# Altium footprint library FootPrintLib_0.PcbLib: 266 footprints (part 5 of 17)
Each footprint in its own frame and in the unit in brackets; x right, y up, seen from the top. Pads: shape width x height; smd on the part's side, far side on the other; paste and mask are expansions set on the pad; w line width, h text height; cw(c..) or ccw(c..) is an arc to the next point about the centre after c.
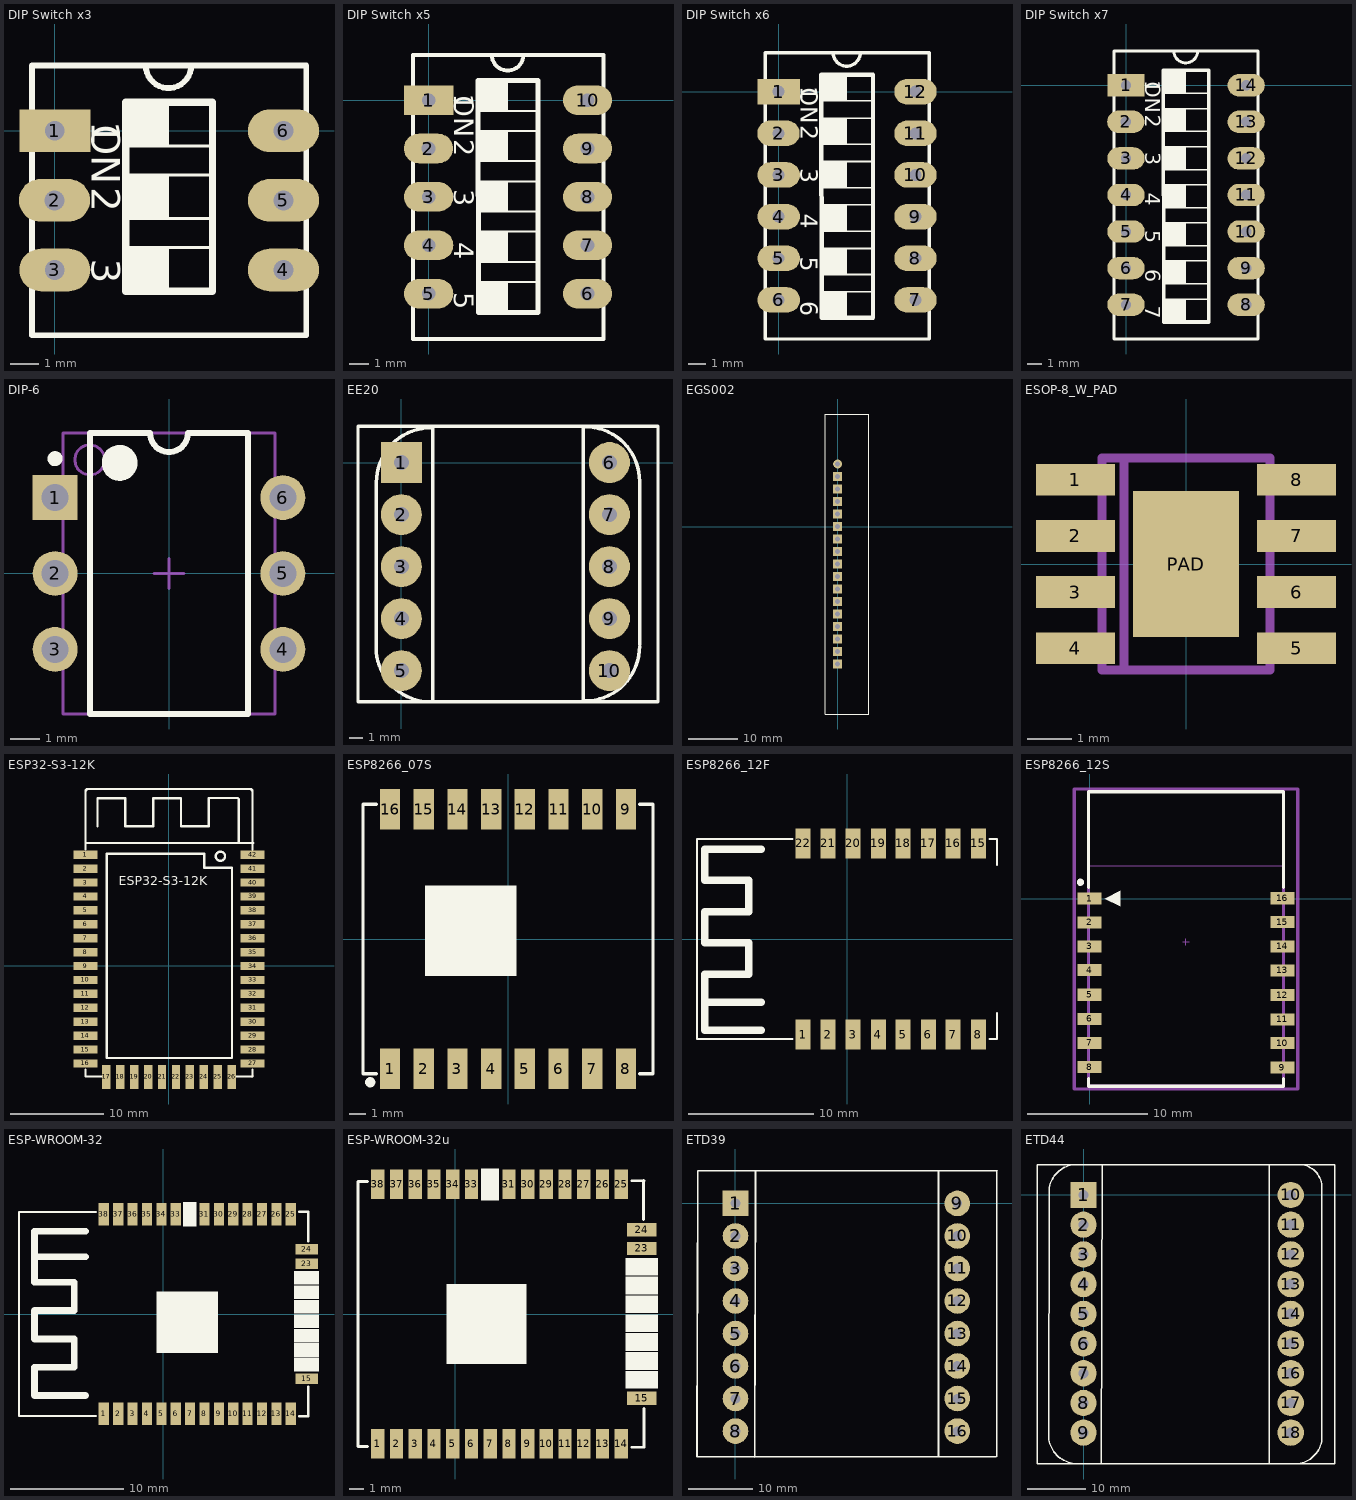
[diagram p4: the footprints below, top view; thin cyan lines are the x and y axes]

## DIP Switch x3 [mm]
height 6.5
pads (6):
  rect 2.5x1.5 hole 0.7: 1(0,0)
  oval 2.5x1.5 hole 0.7: 2(-0.01,-2.45) 3(0,-4.9) 4(8.05,-4.9) 5(8.05,-2.45) 6(8.05,0)
Top Overlay:
  rectangle: 2.5,-5.662 4.025,-4.106
  rectangle: 2.5,-3.106 4.025,-1.55
  rectangle: 2.5,-0.556 4.025,1
  lines w0.1: 2.53,-4.11 5.55,-4.11 ; 2.53,-3.09 5.55,-3.09 ; 2.53,-1.56 5.55,-1.56 ; 2.53,-0.54 5.55,-0.54
  lines w0.2: 3.202,2.3 ccw(c4.002,2.3) 4.802,2.3 ; -0.8,-7.2 8.85,-7.2 8.85,2.3 -0.8,2.3 -0.8,-7.2
  lines w0.25: 2.53,-5.65 5.55,-5.65
  lines w0.254: 2.5,-5.662 2.5,1 5.55,1 5.55,-5.65
  text "3" at 1.295,-4.5 h1
  text "2" at 1.295,-1.98 h1
  text "1" at 1.295,0.33 h1
  text "ON" at 1.295,0.22 h1
3D body "DS1040-03 (DIP_switch).stp": height 6.8, standoff -3.85, extent -0.911,-7.029 8.989,2.051

## DIP Switch x5 [mm]
height 6.5
pads (10):
  rect 2.5x1.5 hole 0.7: 1(0,0)
  oval 2.5x1.5 hole 0.7: 2(-0.01,-2.45) 3(0,-4.9) 4(0,-7.35) 5(0,-9.8) 6(8.05,-9.8) 7(8.05,-7.35) 8(8.05,-4.9) 9(8.05,-2.45) 10(8.05,0)
Top Overlay:
  rectangle: 2.5,-0.556 4.025,1
  rectangle: 2.5,-3.106 4.025,-1.55
  rectangle: 2.5,-5.662 4.025,-4.106
  rectangle: 2.5,-8.216 4.025,-6.66
  rectangle: 2.5,-10.766 4.025,-9.21
  lines w0.1: 2.53,-9.22 5.55,-9.22 ; 2.53,-8.21 5.55,-8.21 ; 2.53,-6.65 5.55,-6.65 ; 2.53,-5.65 5.55,-5.65 ; 2.53,-4.11 5.55,-4.11 ; 2.53,-3.09 5.55,-3.09 ; 2.53,-1.56 5.55,-1.56 ; 2.53,-0.54 5.55,-0.54
  lines w0.2: 3.202,2.3 ccw(c4.002,2.3) 4.802,2.3 ; -0.8,-12.1 -0.8,2.3 8.85,2.3 8.85,-12.1 -0.8,-12.1
  lines w0.25: 2.53,-10.76 5.55,-10.76
  lines w0.254: 2.53,-10.76 2.5,1 5.55,1 5.55,-10.76
  text "ON" at 1.295,0.22 h1
  text "1" at 1.295,0.33 h1
  text "2" at 1.295,-1.98 h1
  text "3" at 1.295,-4.5 h1
  text "4" at 1.295,-7.19 h1
  text "5" at 1.295,-9.72 h1
3D body "DS1040-05 (DIP_switch).stp": height 6.8, standoff -3.85, extent -0.959,-12.001 8.941,2.159

## DIP Switch x6 [mm]
height 6.5
pads (12):
  rect 2.5x1.5 hole 0.7: 1(0,0)
  oval 2.5x1.5 hole 0.7: 2(-0.01,-2.45) 3(0,-4.9) 4(0,-7.35) 5(0,-9.8) 6(0,-12.25) 7(8.05,-12.25) 8(8.05,-9.8) 9(8.05,-7.35) 10(8.05,-4.9) 11(8.05,-2.45) 12(8.05,0)
Top Overlay:
  rectangle: 2.5,-13.316 4.025,-11.76
  rectangle: 2.5,-10.766 4.025,-9.21
  rectangle: 2.5,-8.216 4.025,-6.66
  rectangle: 2.5,-5.662 4.025,-4.106
  rectangle: 2.5,-3.106 4.025,-1.55
  rectangle: 2.5,-0.556 4.025,1
  lines w0.1: 2.53,-11.77 5.55,-11.77 ; 2.53,-10.76 5.55,-10.76 ; 2.53,-9.22 5.55,-9.22 ; 2.53,-8.21 5.55,-8.21 ; 2.53,-6.65 5.55,-6.65 ; 2.53,-5.65 5.55,-5.65 ; 2.53,-4.11 5.55,-4.11 ; 2.53,-3.09 5.55,-3.09 ; 2.53,-1.56 5.55,-1.56 ; 2.53,-0.54 5.55,-0.54
  lines w0.2: 3.202,2.3 ccw(c4.002,2.3) 4.802,2.3 ; -0.8,-14.55 8.85,-14.55 8.85,2.3 -0.8,2.3 -0.8,-14.55
  lines w0.25: 2.53,-13.3 5.55,-13.3
  lines w0.254: 2.53,-13.3 2.5,1 5.55,1 5.55,-13.3
  text "6" at 1.295,-12.34 h1
  text "5" at 1.295,-9.72 h1
  text "4" at 1.295,-7.19 h1
  text "3" at 1.295,-4.5 h1
  text "2" at 1.295,-1.98 h1
  text "1" at 1.295,0.33 h1
  text "ON" at 1.295,0.22 h1
3D body "DS1040-06 (DIP_switch).stp": height 6.8, standoff -3.85, extent -0.908,-14.453 8.992,2.247

## DIP Switch x7 [mm]
height 6.5
pads (14):
  rect 2.5x1.5 hole 0.7: 1(0,0)
  oval 2.5x1.5 hole 0.7: 2(-0.01,-2.45) 3(0,-4.9) 4(0,-7.35) 5(0,-9.8) 6(0,-12.25) 7(0,-14.7) 8(8.05,-14.7) 9(8.05,-12.25) 10(8.05,-9.8) 11(8.05,-7.35) 12(8.05,-4.9) 13(8.05,-2.45) 14(8.05,0)
Top Overlay:
  rectangle: 2.5,-0.556 4.025,1
  rectangle: 2.5,-3.106 4.025,-1.55
  rectangle: 2.5,-5.662 4.025,-4.106
  rectangle: 2.5,-8.216 4.025,-6.66
  rectangle: 2.5,-10.766 4.025,-9.21
  rectangle: 2.5,-13.316 4.025,-11.76
  rectangle: 2.5,-15.876 4.025,-14.32
  lines w0.1: 2.53,-14.33 5.55,-14.33 ; 2.53,-13.3 5.55,-13.3 ; 2.53,-11.77 5.55,-11.77 ; 2.53,-10.76 5.55,-10.76 ; 2.53,-9.22 5.55,-9.22 ; 2.53,-8.21 5.55,-8.21 ; 2.53,-6.65 5.55,-6.65 ; 2.53,-5.65 5.55,-5.65 ; 2.53,-4.11 5.55,-4.11 ; 2.53,-3.09 5.55,-3.09 ; 2.53,-1.56 5.55,-1.56 ; 2.53,-0.54 5.55,-0.54
  lines w0.2: 3.202,2.3 ccw(c4.002,2.3) 4.802,2.3 ; -0.8,-17 -0.8,2.3 8.85,2.3 8.85,-17 -0.8,-17
  lines w0.25: 2.53,-15.86 5.55,-15.86
  lines w0.254: 2.53,-15.86 2.5,1 5.55,1 5.55,-15.86
  text "ON" at 1.295,0.22 h1
  text "1" at 1.295,0.33 h1
  text "2" at 1.295,-1.98 h1
  text "3" at 1.295,-4.5 h1
  text "4" at 1.295,-7.19 h1
  text "5" at 1.295,-9.72 h1
  text "6" at 1.295,-12.34 h1
  text "7" at 1.295,-14.77 h1
3D body "DS1040-07 (DIP_switch).stp": height 6.8, standoff -3.85, extent -0.835,-17.088 9.065,2.152

## DIP-6 [mm] "DIP; 6 Leads; Row Spacing 7.62 mm; Pitch 2.54 mm"
height 5.46
pads (6):
  rect 1.5x1.5 hole 0.9: 1(-3.81,2.54)
  round 1.5 hole 0.9: 2(-3.81,0) 3(-3.81,-2.54) 4(3.81,-2.54) 5(3.81,0) 6(3.81,2.54)
Top Overlay:
  circle w0.25: c-3.81,3.84 r0.125
  circle w0.6: c-1.65,3.7 r0.3
  lines w0.2: -2.65,-4.7 -2.65,4.7 -0.635,4.7 ccw(c0,4.7) 0.635,4.7 2.65,4.7 2.65,-4.7 -2.65,-4.7
Mechanical 13:
  circle w0.1: c-2.65,3.8 r0.5
  lines w0.1: -3.55,-4.7 -3.55,4.7 3.55,4.7 3.55,-4.7 -3.55,-4.7
Mechanical 15:
  lines w0.1: -0.5,0 0.5,0 ; 0,-0.5 0,0.5
3D body "MOC3021.stp": height 4.5, standoff -3.5, extent -3.909,-3.599 4.011,3.701

## EE20 [mm]
pads (10):
  rect 3x3 hole 1.1: 1(0,0)
  round 3 hole 1.1: 2(0,-3.81) 3(0,-7.62) 4(0,-11.43) 5(0,-15.24) 6(15.24,0) 7(15.24,-3.81) 8(15.24,-7.62) 9(15.24,-11.43) 10(15.24,-15.24)
Top Overlay:
  lines w0.254: -1.85,-13.525 ccw(c2.15,-13.525) 2.15,-17.525 ; -1.851,-1.425 -1.848,-13.801 ; -1.825,-1.45 cw(c2.175,-1.45) 2.175,2.55 ; 2.286,-17.475 2.286,2.65 ; 13.314,-17.45 13.314,2.65 ; 13.45,-17.45 ccw(c13.45,-13.45) 17.45,-13.45 ; 13.45,2.625 cw(c13.45,-1.375) 17.45,-1.375 ; 17.45,-13.325 17.45,-1.425 ; -3.175,-17.526 -3.175,2.667 18.796,2.667 18.796,-17.526 -3.175,-17.526
3D body "User Library-Ensamblaje.STEP": height 16.67, standoff -3.53, extent -3.363,-18.978 19.112,4.039

## EGS002 [mm]
pads (17):
  round 1.8 hole 1: P$1(0,12.7)
  rect 1.8x1.8 / inner round 1.8 / far side rect 1.8x1.8 hole 1: P$2(0,10.16) P$3(0,7.62) P$4(0,5.08) P$5(0,2.54) P$6(0,0) P$7(0,-2.54) P$8(0,-5.08) P$9(0,-7.62) P$10(0,-10.16) P$11(0,-12.7) P$12(0,-15.24) P$13(0,-17.78) P$14(0,-20.32) P$15(0,-22.86) P$16(0,-25.4) P$17(0,-27.94)
Top Overlay:
  lines w0.25: -2.54,-38.1 -2.54,22.86 6.35,22.86 6.35,-38.1 -2.54,-38.1
3D body "step_temp.STEP": height 33, standoff -5, extent -0.391,-38.267 4.709,22.733

## ESOP-8_W_PAD [mm]
pads (9):
  rect 1.78x0.72 smd: 1(-2.5,1.905) 2(-2.5,0.635) 3(-2.5,-0.635) 4(-2.5,-1.905) 5(2.5,-1.905) 6(2.5,-0.635) 7(2.5,0.635) 8(2.5,1.905)
  rect 2.4x3.3 smd: PAD(0,0)
Mechanical 13:
  region: 3.1,1.66 2,1.66 2,2.15 3.1,2.15
  region: 3.1,0.39 2,0.39 2,0.88 3.1,0.88
  region: 3.1,-0.88 2,-0.88 2,-0.39 3.1,-0.39
  region: 3.1,-2.15 2,-2.15 2,-1.66 3.1,-1.66
  region: -2,-2.15 -3.1,-2.15 -3.1,-1.66 -2,-1.66
  region: -2,-0.88 -3.1,-0.88 -3.1,-0.39 -2,-0.39
  region: -2,0.39 -3.1,0.39 -3.1,0.88 -2,0.88
  region: -2,1.66 -3.1,1.66 -3.1,2.15 -2,2.15
  lines w0.203: -1.4,-2.4 -1.4,2.4 ; -1.4,-2.4 -1.9,-2.4 -1.9,2.4 -1.4,2.4 ; -1.4,-2.4 1.9,-2.4 1.9,2.4 -1.4,2.4
3D body "step_temp.STEP": height 1.7, standoff 0, extent -3,-2.45 3,2.45

## ESP32-S3-12K [mm]
pads (42):
  rect 2.6x0.9 smd: 1(-9.008,11.983) 2(-9.008,10.482) 3(-9.008,8.981) 4(-9.008,7.48) 5(-9.008,5.979) 6(-9.008,4.478) 7(-9.008,2.977) 8(-9.008,1.476) 9(-9.008,-0.026) 10(-9.008,-1.527) 11(-9.008,-3.028) 12(-9.008,-4.529) 13(-9.008,-6.03) 14(-9.008,-7.531) 15(-9.008,-9.032) 16(-9.008,-10.533) 27(9.008,-10.533) 28(9.008,-9.032) 29(9.008,-7.531) 30(9.008,-6.03) 31(9.008,-4.529) 32(9.008,-3.028) 33(9.008,-1.527) 34(9.008,-0.026) 35(9.008,1.476) 36(9.008,2.977) 37(9.008,4.478) 38(9.008,5.979) 39(9.008,7.48) 40(9.008,8.981) 41(9.008,10.482) 42(9.008,11.983)
  rect 0.9x2.6 smd: 17(-6.759,-11.983) 18(-5.258,-11.983) 19(-3.756,-11.983) 20(-2.254,-11.983) 21(-0.753,-11.983) 22(0.749,-11.983) 23(2.25,-11.983) 24(3.752,-11.983) 25(5.253,-11.983) 26(6.755,-11.983)
Top Layer:
  lines w0.254: 8.992,-11.933 9.008,-11.918
Top Overlay:
  circle w0.254: c5.542,11.817 r0.5
  lines w0.254: -9.008,-11.183 -9.007,-11.933 -7.283,-11.933 ; -9.008,12.567 -9.008,18.813 ; -8.908,13.242 9.067,13.242 ; -7.708,15.067 -7.708,18.067 -4.708,18.067 -4.708,15.067 -1.707,15.067 -1.707,18.067 1.292,18.067 1.292,15.067 4.292,15.067 4.292,18.067 4.317,18.092 7.417,18.092 7.517,17.992 7.517,13.267 ; 7.292,-11.933 9.008,-11.933 9.008,-11.183 ; 9.008,12.532 9.008,18.813 ccw(c8.754,18.813) 8.754,19.067 -8.752,19.067 ccw(c-8.754,18.813) -9.008,18.813 ; -9.008,18.813 -9.008,18.813 ; -6.707,-9.933 6.792,-9.933 6.792,10.567 3.792,10.567 3.792,12.067 -6.707,12.067 -6.707,-9.933
  text "ESP32-S3-12K" at -5.443,8.687 h1
3D body "ESP32-S2-WROVER.STEP": height 2.9, standoff -0.01, extent -9,-11.436 8.993,19.564

## ESP8266_07S [mm]
height 3.2
pads (16):
  rect 1.2x2.4 smd: 1(-7,-7.7) 2(-5,-7.7) 3(-3,-7.7) 4(-1,-7.7) 5(1,-7.7) 6(3,-7.7) 7(5,-7.7) 8(7,-7.7) 9(7,7.7) 10(5,7.7) 11(3,7.7) 12(1,7.7) 13(-1,7.7) 14(-3,7.7) 15(-5,7.7) 16(-7,7.7)
Top Overlay:
  circle w0.4: c-8.175,-8.5 r0.103
  rectangle: -4.928,-2.184 0.508,3.175
  lines w0.2: -7.825,-8 -8.6,-8 -8.6,8 -7.825,8 ; 7.825,-8 8.6,-8 8.6,8 7.825,8
3D body "ESP8266_07S_V1.step": height 3.6, standoff -0.01, extent -8.6,-8 8.6,8

## ESP8266_12F [mm]
height 3.2
pads (16):
  rect 1.2x2.4 smd: 1(-3.5,-7.65) 2(-1.5,-7.65) 3(0.5,-7.65) 4(2.5,-7.65) 5(4.5,-7.65) 6(6.5,-7.65) 7(8.5,-7.65) 8(10.5,-7.65) 15(10.5,7.65) 16(8.5,7.65) 17(6.5,7.65) 18(4.5,7.65) 19(2.5,7.65) 20(0.5,7.65) 21(-1.5,7.65) 22(-3.5,7.65)
Top Overlay:
  lines w0.2: -4.4,-8 -12,-8 -12,8 -4.4,8 ; 11.4,-8 12,-8 12,-5.925 ; 11.4,8 12,8 12,5.925
  lines w0.6: -11.375,-5.05 -6.875,-5.05 ; -6.875,-7.3 -11.375,-7.3 -11.375,-2.8 -7.875,-2.8 -7.875,-1.925 -7.875,-0.3 -11.375,-0.3 -11.375,2.2 -7.875,2.2 -7.875,4.7 -11.375,4.7 -11.375,7.2 -6.875,7.2
3D body "ESP-12F.step": height 3, standoff 0.05, extent -12,-8 12,8

## ESP8266_12S [mm]
pads (16):
  rect 2x1 smd: 1(0,0) 2(0,-1.97) 3(0,-3.97) 4(0,-5.94) 5(0,-7.98) 6(0,-9.99) 7(0,-11.98) 8(0,-13.99) 9(16,-14.03) 10(16,-11.99) 11(16,-10.03) 12(16,-8.01) 13(16,-5.95) 14(16,-3.97) 15(16,-1.95) 16(16,0.03)
Top Overlay:
  circle w0.3: c-0.762,1.356 r0.15
  region: 1.27,0 2.54,-0.635 2.54,0.635
  lines w0.254: -0.084,-14.916 -0.084,-15.568 16.084,-15.568 16.084,-14.916 ; -0.084,0.916 -0.084,8.865 16.084,8.865 16.084,0.916
Mechanical 13:
  lines w0.051: -0.127,2.727 -0.127,8.966 16.129,8.966 16.129,2.727 -0.127,2.727
  lines w0.254: -0.084,-15.568 16.084,-15.568 16.084,8.89 -0.084,8.89 -0.084,-15.568
  text "CUTOUT POLYGON" at 0.127,7.366 h0.25
  text "ANTENNA AREA" at 0.127,7.874 h0.25
Mechanical 15:
  lines w0.1: 7.746,-3.598 8.254,-3.598 ; 8,-3.852 8,-3.344
  lines w0.254: -1.27,-15.799 -1.27,9.093 17.272,9.093 17.272,-15.799 -1.27,-15.799
3D body "User Library-esp-12s.step": height 3.15, standoff 0.03, extent -0.075,-15.456 15.925,8.544

## ESP-WROOM-32 [mm] "ESP-WROOM-32, 39-Leads, Pitch 1.27mm"
height 3.2
pads (30):
  rect 0.9x2 smd: 1(-5.26,-8.8) 2(-3.99,-8.8) 3(-2.72,-8.8) 4(-1.45,-8.8) 5(-0.18,-8.8) 6(1.09,-8.8) 7(2.36,-8.8) 8(3.63,-8.8) 9(4.9,-8.8) 10(6.17,-8.8) 11(7.44,-8.8) 12(8.71,-8.8) 13(9.98,-8.8) 14(11.25,-8.8) 25(11.25,8.8) 26(9.98,8.8) 27(8.71,8.8) 28(7.44,8.8) 29(6.17,8.8) 30(4.9,8.8) 31(3.63,8.8) 33(1.09,8.8) 34(-0.18,8.8) 35(-1.45,8.8) 36(-2.72,8.8) 37(-3.99,8.8) 38(-5.26,8.8)
  rect 2x0.9 smd: 15(12.65,-5.715) 23(12.65,4.445) 24(12.65,5.715)
Top Overlay:
  region: 2.938,7.707 2.938,9.907 1.738,9.907 1.738,7.707
  rectangle: 11.541,1.332 13.741,2.532
  rectangle: 11.541,0.053 13.741,1.253
  rectangle: 11.541,-1.225 13.741,-0.025
  rectangle: 11.541,-2.504 13.741,-1.304
  rectangle: 11.541,-3.782 13.741,-2.582
  rectangle: 11.541,-5.061 13.741,-3.861
  rectangle: 11.541,2.61 13.741,3.81
  rectangle: -0.61,-3.429 4.826,1.981
  lines w0.2: -5.95,-9 -12.75,-9 -12.75,9 -5.95,9 ; 11.99,-9.035 12.79,-9.035 12.79,-6.4 ; 11.99,9.035 12.79,9.035 12.79,6.4
  lines w0.6: -11.375,5.05 -6.875,5.05 ; -6.875,-7.2 -11.375,-7.2 -11.375,-4.7 -7.875,-4.7 -7.875,-2.2 -11.375,-2.2 -11.375,0.3 -7.875,0.3 -7.875,1.925 -7.875,2.8 -11.375,2.8 -11.375,7.3 -6.875,7.3
3D body "KiCAD-ESP-WROOM-32.step": height 3.04, standoff 0, extent -12.75,-9.035 12.79,9.035

## ESP-WROOM-32u [mm] "ESP-WROOM-32, 39-Leads, Pitch 1.27mm"
height 3.2
pads (30):
  rect 0.9x2 smd: 1(-5.26,-8.8) 2(-3.99,-8.8) 3(-2.72,-8.8) 4(-1.45,-8.8) 5(-0.18,-8.8) 6(1.09,-8.8) 7(2.36,-8.8) 8(3.63,-8.8) 9(4.9,-8.8) 10(6.17,-8.8) 11(7.44,-8.8) 12(8.71,-8.8) 13(9.98,-8.8) 14(11.25,-8.8) 25(11.25,8.8) 26(9.98,8.8) 27(8.71,8.8) 28(7.44,8.8) 29(6.17,8.8) 30(4.9,8.8) 31(3.63,8.8) 33(1.09,8.8) 34(-0.18,8.8) 35(-1.45,8.8) 36(-2.72,8.8) 37(-3.99,8.8) 38(-5.26,8.8)
  rect 2x0.9 smd: 15(12.65,-5.715) 23(12.65,4.445) 24(12.65,5.715)
Top Overlay:
  rectangle: -0.61,-3.378 4.826,2.032
  rectangle: 11.541,2.61 13.741,3.81
  rectangle: 11.541,-5.061 13.741,-3.861
  rectangle: 11.541,-3.782 13.741,-2.582
  rectangle: 11.541,-2.504 13.741,-1.304
  rectangle: 11.541,-1.225 13.741,-0.025
  rectangle: 11.541,0.053 13.741,1.253
  region: 2.953,7.681 2.953,9.881 1.753,9.881 1.753,7.681
  rectangle: 11.541,1.332 13.741,2.532
  lines w0.2: -5.95,-9 -6.604,-9 -6.604,9 -5.95,9 ; 11.99,-9.035 12.79,-9.035 12.79,-6.4 ; 11.99,9.035 12.79,9.035 ; 12.773,6.414 12.773,9.049
3D body "ESp32-WROOM-32U v3.step": height 3.4, standoff -0.04, extent -6.56,-9.086 12.68,8.984

## ETD39 [mm]
height 43.4
pads (16):
  rect 4x4 hole 1.5: 1(0.051,0)
  round 4 hole 1.5: 2(0.051,-5.08) 3(0.051,-10.16) 4(0.051,-15.24) 5(0.051,-20.32) 6(0.051,-25.4) 7(0.051,-30.48) 8(0.051,-35.56) 9(34.696,0) 10(34.696,-5.08) 11(34.696,-10.16) 12(34.696,-15.24) 13(34.696,-20.32) 14(34.696,-25.4) 15(34.696,-30.48) 16(34.696,-35.56)
Top Overlay:
  lines w0.254: 3.063,-39.624 3.175,5.055 ; 31.75,-39.548 31.75,4.978 ; 40.869,-39.573 40.869,5.08 ; 40.894,5.08 -5.839,5.08 -5.969,-39.599 40.716,-39.599 ; 40.716,-39.599 40.716,-39.599
3D body "ETD39 Horizontal v7.step": height 35.24, standoff -4.8, extent -5.881,-39.495 40.919,5.105

## ETD44 [mm]
height 43.4
pads (18):
  rect 4.5x4.5 hole 1.75: 1(0,0)
  round 4.5 hole 1.75: 2(0,-5.08) 3(0,-10.16) 4(0,-15.24) 5(0,-20.32) 6(0,-25.4) 7(0,-30.48) 8(0,-35.56) 9(0,-40.64) 10(35.433,0) 11(35.433,-5.08) 12(35.433,-10.16) 13(35.433,-15.24) 14(35.433,-20.32) 15(35.433,-25.4) 16(35.433,-30.48) 17(35.433,-35.56) 18(35.433,-40.64)
Top Overlay:
  lines w0.254: -5.969,-41.783 -5.843,1.27 ; -5.967,-41.824 ccw(c-0.951,-40.871) -0.762,-45.974 ; -5.842,1.27 cw(c-0.953,0.317) -1.929,5.202 ; 3.048,-45.847 3.175,5.207 ; 31.75,-45.847 31.75,5.207 ; 35.56,-45.974 ccw(c36.068,-41.275) 40.767,-41.783 40.767,1.27 ccw(c36.83,1.27) 36.83,5.207 ; -7.874,-45.974 42.926,-45.974 42.926,5.207 -7.874,5.207 -7.874,-45.974
3D body "User Library-ETD44.STEP": height 38.1, standoff -4.5, extent -7.745,-45.12 43.255,4.48